# Altium footprint library Crabit.PcbLib: 17 footprints (part 1 of 2)
Each footprint in its own frame and in the unit in brackets; x right, y up, seen from the top. Pads: shape width x height; smd on the part's side, far side on the other; paste and mask are expansions set on the pad; w line width, h text height; cw(c..) or ccw(c..) is an arc to the next point about the centre after c.
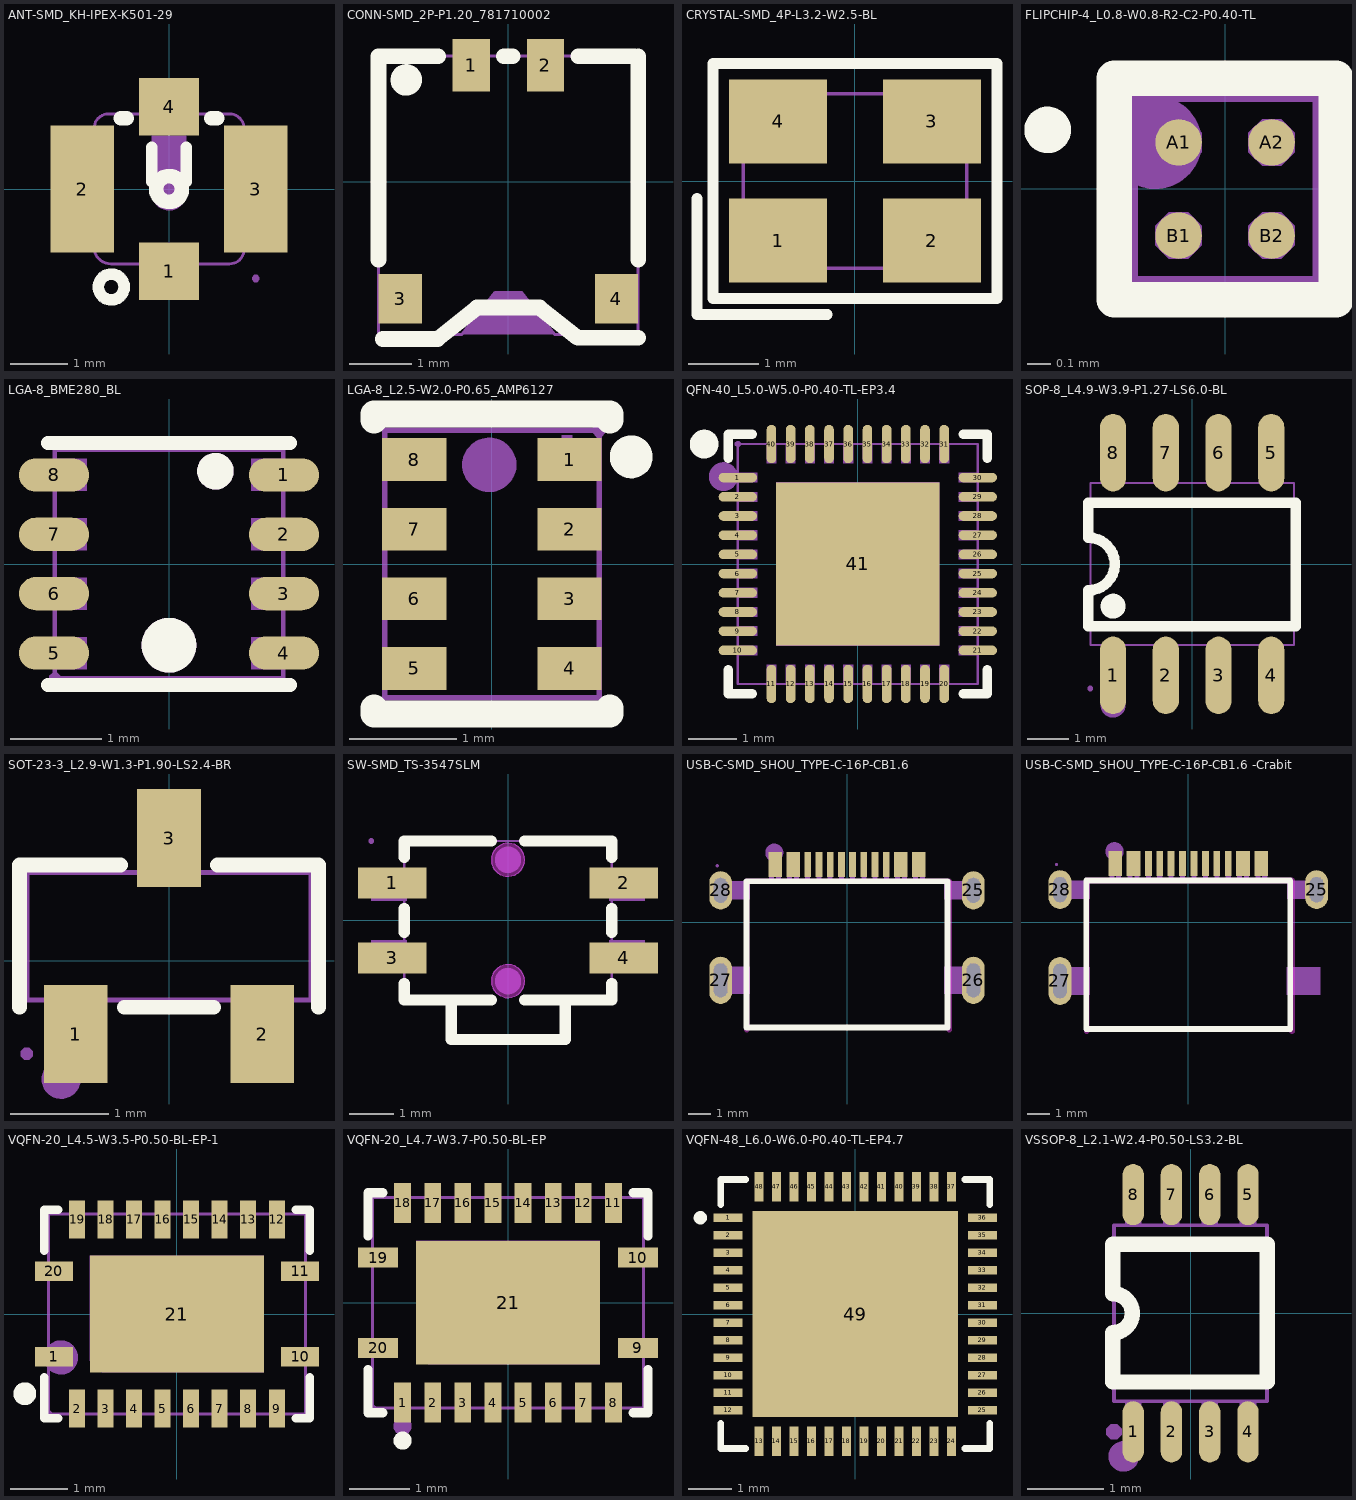
[diagram p0: the footprints below, top view; thin cyan lines are the x and y axes]

## ANT-SMD_KH-IPEX-K501-29 [mm]
pads (4):
  rect 1.049x1.001 smd: 1(0,-1.425) 4(0,1.425)
  rect 1.1x2.2 smd: 2(-1.501,0) 3(1.501,0)
Top Overlay:
  circle w0.201: c-1.001,-1.699 r0.224
  circle w0.254: c0,0 r0.224
  lines w0.201: -0.3,0.124 -0.3,0.724 ; 0.3,0.124 0.3,0.724
  lines w0.254: -0.836,1.224 -0.732,1.224 ; 0.732,1.224 0.836,1.224
Mechanical 16:
  circle w0.3: c0,-0.074 r0.15
  circle w0.201: c-0.3,-1.626 r0.099
  region: 0.3,1.201 -0.3,1.201 -0.3,1.651 0.3,1.651
  region: -0.3,-1.001 0.3,-1.001 0.3,-1.552 -0.3,-1.552
  region: 1.049,-0.899 1.049,0.899 1.501,0.899 1.501,-0.899
  region: -1.049,0.899 -1.049,-0.899 -1.501,-0.899 -1.501,0.899
  region: -0.3,0.925 -0.3,-0.074 0.3,-0.074 0.3,0.925
  region: 1.501,-1.613 1.476,-1.613 1.44,-1.577 1.44,-1.527 1.476,-1.491 1.501,-1.491 1.526,-1.491 1.562,-1.527 1.562,-1.577 1.526,-1.613 1.501,-1.613 1.501,-1.61
  lines w0.051: -1.3,1.054 -1.3,-0.925 -1.3,-1.006 ccw(c-1.008,-1.006) -1.008,-1.298 1.052,-1.298 ccw(c1.052,-1.049) 1.3,-1.049 1.3,-1.044 1.3,1.052 ccw(c1.049,1.052) 1.049,1.303 ; -1.298,1.054 cw(c-1.052,1.054) -1.052,1.3 -1.049,1.3 0.97,1.3 1.049,1.3
3D body "U1~IPEX-SMD_HC-RF-IPEX0303-01~IPEX-SMD_HC-RF-IPEX0303-01~Gh9N.STEP": height 1.27, standoff 0, extent -1.5,-1.55 1.5,1.55

## CONN-SMD_2P-P1.20_781710002 [mm]
pads (4):
  rect 0.6x0.85 smd paste+0 mask+0.05: 1(-0.6,1.887) 2(0.6,1.887)
  rect 0.7x0.8 smd paste+0 mask+0.05: 3(-1.75,-1.887) 4(1.75,-1.887)
Top Overlay:
  circle w0.254: c-1.651,1.651 r0.127
  lines w0.254: -2.1,-1.256 -2.1,-0.513 -2.1,2.032 -1.131,2.032 ; -2.032,-2.54 -1.143,-2.54 -0.508,-2.032 -0.381,-2.032 0.508,-2.032 1.122,-2.519 1.143,-2.519 2.1,-2.519 ; -0.069,2.032 0.069,2.032 ; 1.131,2.032 2.032,2.032 ; 2.1,-1.256 2.1,-0.513 2.1,2.032
Mechanical 6:
  region: -0.75,-2.47 -0.205,-1.785 0.215,-1.785 0.75,-2.465
Mechanical 15:
  region: -0.7,2.065 -0.7,1.69 -0.5,1.69 -0.5,2.065
  region: 0.5,2.065 0.5,1.69 0.7,1.69 0.7,2.065
  region: 1.6,-1.637 1.9,-1.637 1.9,-2.137 1.6,-2.137
  region: -1.9,-1.637 -1.6,-1.637 -1.6,-2.137 -1.9,-2.137
  region: -2.04,2.065 -2.04,2.04 -2.075,2.005 -2.125,2.005 -2.16,2.04 -2.16,2.065 -2.16,2.09 -2.125,2.125 -2.075,2.125 -2.04,2.09 -2.04,2.065
  lines w0.051: -2.1,-2.465 -0.75,-2.465 -0.21,-1.785 0.21,-1.785 0.75,-2.465 2.1,-2.465 2.1,2.035 -2.1,2.035 -2.1,-2.465
3D body "CN1~CONN-SMD_2P-P1.20_781710002~CONN-SMD_2P-P1.20_781710002~pmLh.STEP": height 1.45, standoff 0, extent -2.1,-2.339 2.101,2.191

## CRYSTAL-SMD_4P-L3.2-W2.5-BL [mil]
pads (4):
  rect 55.1x47.2 smd: 1(-43.3,-33.5) 2(43.3,-33.5) 3(43.3,33.5) 4(-43.3,33.5)
Top Overlay:
  lines w6: -88.9,-9.8 -88.9,-75.1 -15.7,-75.1 ; -79.9,-66.1 79.9,-66.1 79.9,66.1 -79.9,66.1 -79.9,-66.1
Mechanical 16:
  circle w10: c-50,-35 r5
  region: -59.1,-13.8 -23.6,-13.8 -23.6,-45.3 -59.1,-45.3
  region: 23.6,-13.8 59.1,-13.8 59.1,-45.3 23.6,-45.3
  region: 23.6,45.3 59.1,45.3 59.1,13.8 23.6,13.8
  region: -59.1,45.3 -23.6,45.3 -23.6,13.8 -59.1,13.8
  region: -63,-51.6 -63.99,-51.6 -65.4,-50.19 -65.4,-48.21 -63.99,-46.8 -63,-46.8 -62.01,-46.8 -60.6,-48.21 -60.6,-50.19 -62.01,-51.6 -63,-51.6
  lines w2: -63,-49.2 63,-49.2 63,49.2 -63,49.2 -63,-49.2

## FLIPCHIP-4_L0.8-W0.8-R2-C2-P0.40-TL [mm]
pads (4):
  round 0.2 smd paste-100 mask+0.051: A1(-0.2,0.2) A2(0.2,0.2) B1(-0.2,-0.2) B2(0.2,-0.2)
Top Overlay:
  circle w0.1: c-0.762,0.254 r0.05
  lines w0.152: -0.476,-0.476 0.476,-0.476 0.476,0.476 -0.476,0.476 -0.476,-0.476
Top Paste:
  region: -0.1,0.28 -0.1,0.12 -0.12,0.1 -0.28,0.1 -0.3,0.12 -0.3,0.28 -0.28,0.3 -0.12,0.3
  region: 0.3,0.28 0.3,0.12 0.28,0.1 0.12,0.1 0.1,0.12 0.1,0.28 0.12,0.3 0.28,0.3
  region: -0.1,-0.12 -0.1,-0.28 -0.12,-0.3 -0.28,-0.3 -0.3,-0.28 -0.3,-0.12 -0.28,-0.1 -0.12,-0.1
  region: 0.3,-0.12 0.3,-0.28 0.28,-0.3 0.12,-0.3 0.1,-0.28 0.1,-0.12 0.12,-0.1 0.28,-0.1
Mechanical 6:
  circle w0.2: c-0.3,0.2 r0.1
Mechanical 15:
  region: -0.34,0.4 -0.34,0.375 -0.375,0.34 -0.425,0.34 -0.46,0.375 -0.46,0.4 -0.46,0.425 -0.425,0.46 -0.375,0.46 -0.34,0.425 -0.34,0.4
  region: -0.1,0.2 -0.1,0.158 -0.158,0.1 -0.241,0.1 -0.3,0.158 -0.3,0.2 -0.3,0.241 -0.241,0.3 -0.158,0.3 -0.1,0.241 -0.1,0.2
  region: 0.3,0.2 0.3,0.158 0.241,0.1 0.158,0.1 0.1,0.158 0.1,0.2 0.1,0.241 0.158,0.3 0.241,0.3 0.3,0.241 0.3,0.2
  region: 0.3,-0.2 0.3,-0.241 0.241,-0.3 0.158,-0.3 0.1,-0.241 0.1,-0.2 0.1,-0.158 0.158,-0.1 0.241,-0.1 0.3,-0.158 0.3,-0.2
  region: -0.1,-0.2 -0.1,-0.241 -0.158,-0.3 -0.241,-0.3 -0.3,-0.241 -0.3,-0.2 -0.3,-0.158 -0.241,-0.1 -0.158,-0.1 -0.1,-0.158 -0.1,-0.2
  lines w0.051: -0.4,-0.4 -0.4,0.4 0.4,0.4 0.4,-0.4 -0.4,-0.4
3D body "U2~FLIPCHIP-4_L0.8-W0.8-R2-C2-P0.40-TL~FLIPCHIP-4_L0.8-W0.8-R2-C2-P0.40-TL~ZRPX.STEP": height 0.61, standoff 0, extent -0.385,-0.385 0.385,0.385

## LGA-8_BME280_BL [mm]
pads (8):
  oval 0.767x0.364 smd: 1(1.259,0.975) 2(1.259,0.325) 3(1.259,-0.325) 4(1.259,-0.975) 5(-1.259,-0.975) 6(-1.259,-0.325) 7(-1.259,0.325) 8(-1.259,0.975)
Top Overlay:
  circle w0.3: c0,-0.889 r0.15
  circle w0.2: c0.508,1.016 r0.1
  lines w0.152: -1.326,-1.326 1.326,-1.326 ; -1.326,1.326 1.326,1.326
Mechanical 6:
  drawing of 34 lines, arcs and shapes, not listed
Mechanical 15:
  region: -1.25,-1.15 -0.9,-1.15 -0.9,-0.8 -1.25,-0.8
  region: -1.25,-0.5 -0.9,-0.5 -0.9,-0.15 -1.25,-0.15
  region: -1.25,0.15 -0.9,0.15 -0.9,0.5 -1.25,0.5
  region: -1.25,0.8 -0.9,0.8 -0.9,1.15 -1.25,1.15
  region: 1.25,0.8 0.9,0.8 0.9,1.15 1.25,1.15
  region: 1.25,0.15 0.9,0.15 0.9,0.5 1.25,0.5
  region: 1.25,-0.5 0.9,-0.5 0.9,-0.15 1.25,-0.15
  region: 1.25,-1.15 0.9,-1.15 0.9,-0.8 1.25,-0.8
  region: -1.19,-1.25 -1.19,-1.275 -1.225,-1.31 -1.275,-1.31 -1.31,-1.275 -1.31,-1.25 -1.31,-1.225 -1.275,-1.19 -1.225,-1.19 -1.19,-1.225 -1.19,-1.25
  lines w0.051: -1.25,-1.25 -1.25,1.25 1.25,1.25 1.25,-1.25 -1.25,-1.25
3D body "U1~LGA-8_BME280_BL~LGA-8_L2.5-W2.5-H0.9-P0.65~ZRPX.STEP": height 0.94, standoff 0, extent -1.25,-1.25 1.25,1.25

## LGA-8_L2.5-W2.0-P0.65_AMP6127 [mm]
pads (8):
  rect 0.6x0.4 smd: 1(0.725,0.975) 2(0.725,0.325) 3(0.725,-0.325) 4(0.725,-0.975) 5(-0.725,-0.975) 6(-0.725,-0.325) 7(-0.725,0.325) 8(-0.725,0.975)
Top Overlay:
  circle w0.2: c1.3,1 r0.1
  lines w0.254: -1.1,-1.344 -1.1,-1.4 1.1,-1.4 1.1,-1.344 ; -1.1,1.344 -1.1,1.4 1.1,1.4 1.1,1.344
Mechanical 6:
  circle w0.254: c-0.025,0.925 r0.127
  region: 0.65,1.2 0.65,0.8 0.75,0.8 0.75,1.2
Mechanical 15:
  region: 1.06,1.25 1.06,1.225 1.025,1.19 0.975,1.19 0.94,1.225 0.94,1.25 0.94,1.275 0.975,1.31 1.025,1.31 1.06,1.275 1.06,1.25
  region: 0.55,1.125 0.9,1.125 0.9,0.825 0.55,0.825
  region: 0.55,0.475 0.9,0.475 0.9,0.175 0.55,0.175
  region: 0.55,-0.175 0.9,-0.175 0.9,-0.475 0.55,-0.475
  region: 0.55,-0.825 0.9,-0.825 0.9,-1.125 0.55,-1.125
  region: -0.9,1.125 -0.55,1.125 -0.55,0.825 -0.9,0.825
  region: -0.9,0.475 -0.55,0.475 -0.55,0.175 -0.9,0.175
  region: -0.9,-0.175 -0.55,-0.175 -0.55,-0.475 -0.9,-0.475
  region: -0.9,-0.825 -0.55,-0.825 -0.55,-1.125 -0.9,-1.125
  lines w0.051: -1,-1.25 1,-1.25 1,1.25 -1,1.25 -1,-1.25
3D body "U1~LGA-8_L2.5-W2.0-P0.65_AMP6127~LGA-8_L2.5-W2.0-P0.65_AMP6127~tHiy.STEP": height 0.96, standoff 0, extent -1,-1.25 1,1.25

## QFN-40_L5.0-W5.0-P0.40-TL-EP3.4 [mm]
pads (41):
  oval 0.8x0.2 smd paste-100 mask+0.05: 1(-2.5,1.8) 2(-2.5,1.4) 3(-2.5,1) 4(-2.5,0.6) 5(-2.5,0.2) 6(-2.5,-0.2) 7(-2.5,-0.6) 8(-2.5,-1) 9(-2.5,-1.4) 10(-2.5,-1.8) 21(2.5,-1.8) 22(2.5,-1.4) 23(2.5,-1) 24(2.5,-0.6) 25(2.5,-0.2) 26(2.5,0.2) 27(2.5,0.6) 28(2.5,1) 29(2.5,1.4) 30(2.5,1.8)
  oval 0.2x0.8 smd paste-100 mask+0.05: 11(-1.8,-2.5) 12(-1.4,-2.5) 13(-1,-2.5) 14(-0.6,-2.5) 15(-0.2,-2.5) 16(0.2,-2.5) 17(0.6,-2.5) 18(1,-2.5) 19(1.4,-2.5) 20(1.8,-2.5) 31(1.8,2.5) 32(1.4,2.5) 33(1,2.5) 34(0.6,2.5) 35(0.2,2.5) 36(-0.2,2.5) 37(-0.6,2.5) 38(-1,2.5) 39(-1.4,2.5) 40(-1.8,2.5)
  rect 3.4x3.4 smd paste-100 mask+0.05: 41(0,0)
Top Overlay:
  lines w0.2: -2.7,-2.2 -2.7,-2.7 -2.2,-2.7 ; -2.7,2.2 -2.7,2.7 -2.2,2.7 ; 2.2,-2.7 2.7,-2.7 2.7,-2.2 ; 2.2,2.7 2.7,2.7 2.7,2.2
  lines w0.3: -3.051,2.497 cw(c-3.201,2.498) -3.051,2.499
Top Paste:
  drawing of 41 lines, arcs and shapes, not listed
Mechanical 6:
  circle w0.3: c-2.802,1.82 r0.15
Mechanical 15:
  drawing of 46 lines, arcs and shapes, not listed
3D body "QFN-40_L5.0-W5.0-P0.40-TL-EP3.4~QFN-40_L5.0-W5.0-H0.9-P0.4-TL-EP~GaEe.STEP": height 0.85, standoff 0, extent -2.5,-2.5 2.5,2.5

## SOP-8_L4.9-W3.9-P1.27-LS6.0-BL [mm]
pads (8):
  oval 0.63x1.864 smd: 1(-1.905,-2.682) 2(-0.635,-2.682) 3(0.635,-2.682) 4(1.905,-2.682) 5(1.905,2.682) 6(0.635,2.682) 7(-0.635,2.682) 8(-1.905,2.682)
Top Overlay:
  circle w0.3: c-1.905,-1.016 r0.15
  lines w0.254: -2.499,-1.499 -2.499,-0.635 ccw(c-2.499,0) -2.499,0.635 -2.499,1.481 2.499,1.481 2.499,-1.499 -2.499,-1.499
Mechanical 16:
  circle w0.3: c-1.905,-3.401 r0.15
  region: -2.451,-2.939 -2.426,-2.939 -2.39,-2.974 -2.39,-3.025 -2.426,-3.061 -2.451,-3.061 -2.476,-3.061 -2.512,-3.025 -2.512,-2.974 -2.476,-2.939 -2.451,-2.939
  region: 1.694,2.164 1.694,3 2.116,3 2.116,2.164
  region: 0.424,2.164 0.424,3 0.846,3 0.846,2.164
  region: -0.846,2.164 -0.846,3 -0.424,3 -0.424,2.164
  region: -2.116,2.164 -2.116,3 -1.694,3 -1.694,2.164
  region: 1.694,-3 1.694,-2.164 2.116,-2.164 2.116,-3
  region: 0.424,-3 0.424,-2.164 0.846,-2.164 0.846,-3
  region: -0.846,-3 -0.846,-2.164 -0.424,-2.164 -0.424,-3
  region: -2.116,-3 -2.116,-2.164 -1.694,-2.164 -1.694,-3
  region: 1.694,2.233 2.116,2.233 2.116,1.943 1.694,1.943
  region: 0.424,2.233 0.846,2.233 0.846,1.943 0.424,1.943
  region: -0.846,2.233 -0.424,2.233 -0.424,1.943 -0.846,1.943
  region: -2.116,2.233 -1.694,2.233 -1.694,1.943 -2.116,1.943
  region: -1.694,-2.233 -2.116,-2.233 -2.116,-1.943 -1.694,-1.943
  region: -0.424,-2.233 -0.846,-2.233 -0.846,-1.943 -0.424,-1.943
  region: 0.846,-2.233 0.424,-2.233 0.424,-1.943 0.846,-1.943
  region: 2.116,-2.233 1.694,-2.233 1.694,-1.943 2.116,-1.943
  lines w0.051: -2.451,-1.951 -2.451,1.951 2.451,1.951 2.451,-1.951 -2.451,-1.951
3D body "SOP8.STEP": height 1.6, standoff 0, extent -2.51,-3.021 2.51,3.021

## SOT-23-3_L2.9-W1.3-P1.90-LS2.4-BR [mm]
pads (3):
  rect 0.65x1 smd: 1(-0.95,-0.746) 2(0.95,-0.746) 3(0,1.254)
Top Overlay:
  lines w0.152: -1.526,-0.472 -1.526,0.98 -0.495,0.98 ; -0.455,-0.472 0.455,-0.472 ; 0.495,0.98 1.526,0.98 1.526,-0.472
Mechanical 6:
  circle w0.2: c-1.1,-1.206 r0.1
Mechanical 15:
  region: -0.215,1.454 0.215,1.454 0.215,1.154 -0.215,1.154
  region: -0.215,1.164 0.215,1.164 0.215,0.894 -0.215,0.894
  region: -1.165,-0.646 -0.735,-0.646 -0.735,-0.946 -1.165,-0.946
  region: -1.165,-0.386 -0.735,-0.386 -0.735,-0.656 -1.165,-0.656
  region: 0.735,-0.646 1.165,-0.646 1.165,-0.946 0.735,-0.946
  region: 0.735,-0.386 1.165,-0.386 1.165,-0.656 0.735,-0.656
  region: -1.45,-1.006 -1.475,-1.006 -1.51,-0.971 -1.51,-0.921 -1.475,-0.886 -1.45,-0.886 -1.425,-0.886 -1.39,-0.921 -1.39,-0.971 -1.425,-1.006 -1.45,-1.006
  lines w0.051: -1.45,-0.396 -1.45,0.904 1.45,0.904 1.45,-0.396 -1.45,-0.396
3D body "SOT-23-3.STEP": height 1.2, standoff 0, extent -1.45,-1.146 1.45,1.654

## SW-SMD_TS-3547SLM [mm]
pads (4):
  rect 1.55x0.7 smd: 1(-2.625,0.85) 2(2.625,0.85) 3(-2.625,-0.85) 4(2.625,-0.85)
Top Overlay:
  lines w0.254: -2.35,-1.431 -2.35,-1.8 -0.376,-1.8 ; -2.35,-0.269 -2.35,0.269 ; -2.35,1.431 -2.35,1.8 -0.376,1.8 ; -1.285,-1.8 ccw(c-1.284,-1.801) -1.285,-1.801 -1.285,-2.7 0.015,-2.7 ; 0,-2.7 1.3,-2.7 1.3,-1.8 ; 0.376,-1.8 2.35,-1.8 2.35,-1.431 ; 0.376,1.8 2.35,1.8 2.35,1.431 ; 2.35,-0.269 2.35,0.269
Keep-Out Layer:
  board cut-out: 0.375,1.375 0.375,1.3 0.318,1.162 0.212,1.057 0.075,1 -0.075,1 -0.212,1.057 -0.318,1.162 -0.375,1.3 -0.375,1.375 -0.375,1.449 -0.318,1.587 -0.212,1.693 -0.075,1.75 0.075,1.75 0.212,1.693 0.318,1.587 0.375,1.449 0.375,1.375
  board cut-out: 0.375,-1.375 0.375,-1.449 0.318,-1.587 0.212,-1.693 0.075,-1.75 -0.075,-1.75 -0.212,-1.693 -0.318,-1.587 -0.375,-1.449 -0.375,-1.375 -0.375,-1.3 -0.318,-1.162 -0.212,-1.057 -0.075,-1 0.075,-1 0.212,-1.057 0.318,-1.162 0.375,-1.3 0.375,-1.375
Keep-Out Layer:
  circle w0.005: c0,1.375 r0.375
  circle w0.005: c0,-1.375 r0.375
  region: 0.375,1.375 0.375,1.3 0.318,1.162 0.212,1.057 0.075,1 -0.075,1 -0.212,1.057 -0.318,1.162 -0.375,1.3 -0.375,1.375 -0.375,1.449 -0.318,1.587 -0.212,1.693 -0.075,1.75 0.075,1.75 0.212,1.693 0.318,1.587 0.375,1.449 0.375,1.375
  region: 0.375,-1.375 0.375,-1.449 0.318,-1.587 0.212,-1.693 0.075,-1.75 -0.075,-1.75 -0.212,-1.693 -0.318,-1.587 -0.375,-1.449 -0.375,-1.375 -0.375,-1.3 -0.318,-1.162 -0.212,-1.057 -0.075,-1 0.075,-1 0.212,-1.057 0.318,-1.162 0.375,-1.3 0.375,-1.375
Mechanical 1:
  circle w0.005: c0,1.375 r0.375
  circle w0.005: c0,-1.375 r0.375
Mechanical 6:
  circle w0.3: c0,-1.375 r0.15
  circle w0.3: c0,1.375 r0.15
Mechanical 15:
  region: -3.04,1.8 -3.04,1.775 -3.075,1.74 -3.125,1.74 -3.16,1.775 -3.16,1.8 -3.16,1.825 -3.125,1.86 -3.075,1.86 -3.04,1.825 -3.04,1.8
  region: 2.3,1.05 3.1,1.05 3.1,0.45 2.3,0.45
  region: 2.3,-0.45 3.1,-0.45 3.1,-1.05 2.3,-1.05
  region: -3.1,-0.45 -2.3,-0.45 -2.3,-1.05 -3.1,-1.05
  region: -3.1,1.05 -2.3,1.05 -2.3,0.45 -3.1,0.45
  lines w0.051: -2.35,-1.8 -1.3,-1.8 -1.3,-2.7 1.3,-2.7 1.3,-1.8 2.35,-1.8 2.35,1.8 -2.35,1.8 -2.35,-1.8
3D body "SW1~SW-SMD_TS-3547SLM~SW-SMD_TS-3547SLM~YKUx.STEP": height 1.65, standoff -0.65, extent -3.1,-2.752 3.1,1.799

## USB-C-SMD_SHOU_TYPE-C-16P-CB1.6 [mm]
pads (20):
  oval 1x1.7 hole 0.6 slot 1.1 at 90 deg paste+0 mask+0.05: 25(5.62,1.425) 28(-5.62,1.425)
  oval 1x2.1 hole 0.6 slot 1.5 at 90 deg copper offset 0,0 paste+0 mask+0.05: 26(5.62,-2.575) 27(-5.62,-2.575)
  rect 0.3x1.1 smd paste-100 mask+0.05: A1(-3.35,2.575) A4(-2.55,2.575) A5(-1.25,2.575) A6(-0.25,2.575) A7(0.25,2.575) A8(1.25,2.575) A9(2.55,2.575) A12(3.35,2.575) B1(3.05,2.575) B4(2.25,2.575) B5(1.75,2.575) B6(0.75,2.575) B7(-0.75,2.575) B8(-1.75,2.575) B9(-2.25,2.575) B12(-3.05,2.575)
Top Overlay:
  lines w0.254: -4.47,-4.675 -4.47,1.825 4.47,1.825 4.47,-4.675 -4.47,-4.675
Top Paste:
  drawing of 16 lines, arcs and shapes, not listed
Keep-Out Layer:
  lines w0.254: -4.451,1.824 4.549,1.824 ; -4.451,1.824 -4.451,-4.776 -4.451,1.824 ; -4.451,1.824 4.549,1.824 ; 4.549,1.824 4.549,-4.776 4.549,1.824
Mechanical 6:
  circle w0.4: c-3.232,3.101 r0.2
Mechanical 15:
  region: -5.71,2.524 -5.71,2.499 -5.745,2.464 -5.795,2.464 -5.83,2.499 -5.83,2.524 -5.83,2.549 -5.795,2.584 -5.745,2.584 -5.71,2.549 -5.71,2.524
  region: -3.45,2.524 -3.25,2.524 -3.25,1.724 -3.45,1.724
  region: -3.15,2.524 -2.95,2.524 -2.95,1.724 -3.15,1.724
  region: -2.65,2.524 -2.45,2.524 -2.45,1.724 -2.65,1.724
  region: -2.35,2.524 -2.15,2.524 -2.15,1.724 -2.35,1.724
  region: -1.85,2.524 -1.65,2.524 -1.65,1.724 -1.85,1.724
  region: -1.35,2.524 -1.15,2.524 -1.15,1.724 -1.35,1.724
  region: -0.85,2.524 -0.65,2.524 -0.65,1.724 -0.85,1.724
  region: -0.35,2.524 -0.15,2.524 -0.15,1.724 -0.35,1.724
  region: 0.15,2.524 0.35,2.524 0.35,1.724 0.15,1.724
  region: 0.65,2.524 0.85,2.524 0.85,1.724 0.65,1.724
  region: 1.15,2.524 1.35,2.524 1.35,1.724 1.15,1.724
  region: 1.65,2.524 1.85,2.524 1.85,1.724 1.65,1.724
  region: 2.15,2.524 2.35,2.524 2.35,1.724 2.15,1.724
  region: 2.45,2.524 2.65,2.524 2.65,1.724 2.45,1.724
  region: 2.95,2.524 3.15,2.524 3.15,1.724 2.95,1.724
  region: 3.25,2.524 3.45,2.524 3.45,1.724 3.25,1.724
  region: -5.77,1.825 -5.47,1.825 -5.47,1.025 -5.77,1.025
  region: 5.47,1.825 5.77,1.825 5.77,1.025 5.47,1.025
  region: -5.77,-1.975 -5.47,-1.975 -5.47,-3.175 -5.77,-3.175
  region: 5.47,-1.975 5.77,-1.975 5.77,-3.175 5.47,-3.175
  region: -4.315,1.02 -5.765,1.02 -5.765,1.82 -4.315,1.82
  region: -4.315,-3.17 -5.765,-3.17 -5.765,-1.97 -4.315,-1.97
  region: 5.775,1.02 4.325,1.02 4.325,1.82 5.775,1.82
  region: 5.77,-3.18 4.32,-3.18 4.32,-1.98 5.77,-1.98
  lines w0.051: -4.47,-4.676 -4.47,1.824 4.47,1.824 4.47,-4.676 -4.47,-4.676
3D body "USB1~USB-C-SMD_SHOU_TYPE-C-16P-CB1.6~USB-C-SMD_SHOU_TYPE-C-16P-CB1.6~pmLh.STEP": height 1.56, standoff -1.6, extent -5.77,-4.548 5.77,2.652

## USB-C-SMD_SHOU_TYPE-C-16P-CB1.6 -Crabit [mm]
pads (19):
  oval 1x1.7 hole 0.6 slot 1.1 at 90 deg paste+0 mask+0.05: 25(5.62,1.425) 28(-5.62,1.425)
  oval 1x2.1 hole 0.6 slot 1.5 at 90 deg copper offset 0,0 paste+0 mask+0.05: 27(-5.62,-2.575)
  rect 0.3x1.1 smd paste-100 mask+0.05: A1(-3.35,2.575) A4(-2.55,2.575) A5(-1.25,2.575) A6(-0.25,2.575) A7(0.25,2.575) A8(1.25,2.575) A9(2.55,2.575) A12(3.35,2.575) B1(3.05,2.575) B4(2.25,2.575) B5(1.75,2.575) B6(0.75,2.575) B7(-0.75,2.575) B8(-1.75,2.575) B9(-2.25,2.575) B12(-3.05,2.575)
Top Overlay:
  lines w0.254: -4.47,-4.675 -4.47,1.825 4.47,1.825 4.47,-4.675 -4.47,-4.675
Top Paste:
  drawing of 15 lines, arcs and shapes, not listed
Keep-Out Layer:
  lines w0.254: -4.451,1.824 4.549,1.824 ; -4.451,1.824 -4.451,-4.776 -4.451,1.824 ; -4.451,1.824 4.549,1.824 ; 4.549,1.824 4.549,-4.776 4.549,1.824
Mechanical 6:
  circle w0.4: c-3.232,3.101 r0.2
Mechanical 15:
  region: -5.71,2.524 -5.71,2.499 -5.745,2.464 -5.795,2.464 -5.83,2.499 -5.83,2.524 -5.83,2.549 -5.795,2.584 -5.745,2.584 -5.71,2.549 -5.71,2.524
  region: -3.45,2.524 -3.25,2.524 -3.25,1.724 -3.45,1.724
  region: -3.15,2.524 -2.95,2.524 -2.95,1.724 -3.15,1.724
  region: -2.65,2.524 -2.45,2.524 -2.45,1.724 -2.65,1.724
  region: -2.35,2.524 -2.15,2.524 -2.15,1.724 -2.35,1.724
  region: -1.85,2.524 -1.65,2.524 -1.65,1.724 -1.85,1.724
  region: -1.35,2.524 -1.15,2.524 -1.15,1.724 -1.35,1.724
  region: -0.85,2.524 -0.65,2.524 -0.65,1.724 -0.85,1.724
  region: -0.35,2.524 -0.15,2.524 -0.15,1.724 -0.35,1.724
  region: 0.15,2.524 0.35,2.524 0.35,1.724 0.15,1.724
  region: 0.65,2.524 0.85,2.524 0.85,1.724 0.65,1.724
  region: 1.15,2.524 1.35,2.524 1.35,1.724 1.15,1.724
  region: 1.65,2.524 1.85,2.524 1.85,1.724 1.65,1.724
  region: 2.15,2.524 2.35,2.524 2.35,1.724 2.15,1.724
  region: 2.45,2.524 2.65,2.524 2.65,1.724 2.45,1.724
  region: 2.95,2.524 3.15,2.524 3.15,1.724 2.95,1.724
  region: 3.25,2.524 3.45,2.524 3.45,1.724 3.25,1.724
  region: -5.77,1.825 -5.47,1.825 -5.47,1.025 -5.77,1.025
  region: 5.47,1.825 5.77,1.825 5.77,1.025 5.47,1.025
  region: -5.77,-1.975 -5.47,-1.975 -5.47,-3.175 -5.77,-3.175
  region: 5.47,-1.975 5.77,-1.975 5.77,-3.175 5.47,-3.175
  region: -4.315,1.02 -5.765,1.02 -5.765,1.82 -4.315,1.82
  region: -4.315,-3.17 -5.765,-3.17 -5.765,-1.97 -4.315,-1.97
  region: 5.775,1.02 4.325,1.02 4.325,1.82 5.775,1.82
  region: 5.77,-3.18 4.32,-3.18 4.32,-1.98 5.77,-1.98
  lines w0.051: -4.47,-4.676 -4.47,1.824 4.47,1.824 4.47,-4.676 -4.47,-4.676
3D body "USB1~USB-C-SMD_SHOU_TYPE-C-16P-CB1.6~USB-C-SMD_SHOU_TYPE-C-16P-CB1.6~pmLh.STEP": height 1.56, standoff -1.6, extent -5.77,-4.548 5.77,2.652

## VQFN-20_L4.5-W3.5-P0.50-BL-EP-1 [mm]
pads (21):
  rect 0.665x0.336 smd: 1(-2.157,-0.75) 10(2.157,-0.75) 11(2.157,0.75) 20(-2.157,0.75)
  rect 0.28x0.665 smd: 2(-1.75,-1.658) 3(-1.25,-1.658) 4(-0.75,-1.658) 5(-0.25,-1.658) 6(0.25,-1.658) 7(0.75,-1.658) 8(1.25,-1.658) 9(1.75,-1.658) 12(1.75,1.658) 13(1.25,1.658) 14(0.75,1.658) 15(0.25,1.658) 16(-0.25,1.658) 17(-0.75,1.658) 18(-1.25,1.658) 19(-1.75,1.658)
  rect 3.05x2.05 smd: 21(0,0)
Top Overlay:
  circle w0.2: c-2.667,-1.397 r0.1
  lines w0.152: -2.326,-1.109 -2.326,-1.826 -2.08,-1.826 ; -2.326,1.109 -2.326,1.826 -2.08,1.826 ; 2.08,-1.826 2.326,-1.826 2.326,-1.109 ; 2.08,1.826 2.326,1.826 2.326,1.109
Mechanical 6:
  circle w0.3: c-2.032,-0.762 r0.15
Mechanical 15:
  region: -2.19,-1.75 -2.19,-1.775 -2.225,-1.81 -2.275,-1.81 -2.31,-1.775 -2.31,-1.75 -2.31,-1.725 -2.275,-1.69 -2.225,-1.69 -2.19,-1.725 -2.19,-1.75
  region: -1.87,-1.75 -1.87,-1.35 -1.63,-1.35 -1.63,-1.75
  region: -1.37,-1.75 -1.37,-1.35 -1.13,-1.35 -1.13,-1.75
  region: -0.87,-1.75 -0.87,-1.35 -0.63,-1.35 -0.63,-1.75
  region: -0.37,-1.75 -0.37,-1.35 -0.13,-1.35 -0.13,-1.75
  region: 0.13,-1.75 0.13,-1.35 0.37,-1.35 0.37,-1.75
  region: 0.63,-1.75 0.63,-1.35 0.87,-1.35 0.87,-1.75
  region: 1.13,-1.75 1.13,-1.35 1.37,-1.35 1.37,-1.75
  region: 1.63,-1.75 1.63,-1.35 1.87,-1.35 1.87,-1.75
  region: 1.85,-0.87 1.85,-0.63 2.25,-0.63 2.25,-0.87
  region: 1.85,0.63 1.85,0.87 2.25,0.87 2.25,0.63
  region: 1.63,1.75 1.63,1.35 1.87,1.35 1.87,1.75
  region: 1.13,1.75 1.13,1.35 1.37,1.35 1.37,1.75
  region: 0.63,1.75 0.63,1.35 0.87,1.35 0.87,1.75
  region: 0.13,1.75 0.13,1.35 0.37,1.35 0.37,1.75
  region: -0.37,1.75 -0.37,1.35 -0.13,1.35 -0.13,1.75
  region: -0.87,1.75 -0.87,1.35 -0.63,1.35 -0.63,1.75
  region: -1.37,1.75 -1.37,1.35 -1.13,1.35 -1.13,1.75
  region: -1.87,1.75 -1.87,1.35 -1.63,1.35 -1.63,1.75
  region: -1.85,0.63 -1.85,0.87 -2.25,0.87 -2.25,0.63
  region: -1.85,-0.87 -1.85,-0.63 -2.25,-0.63 -2.25,-0.87
  region: -1.525,-0.82 -1.525,1.025 1.525,1.025 1.525,-1.025 -1.32,-1.025
  lines w0.051: -2.25,-1.75 -2.25,1.75 2.25,1.75 2.25,-1.75 -2.25,-1.75
3D body "U1~VQFN-20_L4.5-W3.5-P0.50-BL-EP-1~VQFN-20_L4.5-W3.5-H1.0-P0.50~Vvab.STEP": height 1.02, standoff 0, extent -2.26,-1.76 2.26,1.76

## VQFN-20_L4.7-W3.7-P0.50-BL-EP [mm]
pads (21):
  rect 0.28x0.665 smd: 1(-1.75,-1.658) 2(-1.25,-1.658) 3(-0.75,-1.658) 4(-0.25,-1.658) 5(0.25,-1.658) 6(0.75,-1.658) 7(1.25,-1.658) 8(1.75,-1.658) 11(1.75,1.658) 12(1.25,1.658) 13(0.75,1.658) 14(0.25,1.658) 15(-0.25,1.658) 16(-0.75,1.658) 17(-1.25,1.658) 18(-1.75,1.658)
  rect 0.665x0.336 smd: 9(2.157,-0.75) 10(2.157,0.75) 19(-2.157,0.75) 20(-2.157,-0.75)
  rect 3.05x2.05 smd: 21(0,0)
Top Overlay:
  circle w0.15: c-1.75,-2.29 r0.075
  lines w0.152: -2.326,-1.109 -2.326,-1.826 -2.08,-1.826 ; -2.326,1.109 -2.326,1.826 -2.08,1.826 ; 2.08,-1.826 2.326,-1.826 2.326,-1.109 ; 2.08,1.826 2.326,1.826 2.326,1.109
Mechanical 6:
  circle w0.15: c-1.75,-2.05 r0.075
Mechanical 15:
  region: -1.525,-0.82 -1.525,1.025 1.525,1.025 1.525,-1.025 -1.32,-1.025
  region: -1.85,-0.87 -1.85,-0.63 -2.25,-0.63 -2.25,-0.87
  region: -1.85,0.63 -1.85,0.87 -2.25,0.87 -2.25,0.63
  region: -1.87,1.75 -1.87,1.35 -1.63,1.35 -1.63,1.75
  region: -1.37,1.75 -1.37,1.35 -1.13,1.35 -1.13,1.75
  region: -0.87,1.75 -0.87,1.35 -0.63,1.35 -0.63,1.75
  region: -0.37,1.75 -0.37,1.35 -0.13,1.35 -0.13,1.75
  region: 0.13,1.75 0.13,1.35 0.37,1.35 0.37,1.75
  region: 0.63,1.75 0.63,1.35 0.87,1.35 0.87,1.75
  region: 1.13,1.75 1.13,1.35 1.37,1.35 1.37,1.75
  region: 1.63,1.75 1.63,1.35 1.87,1.35 1.87,1.75
  region: 1.85,0.63 1.85,0.87 2.25,0.87 2.25,0.63
  region: 1.85,-0.87 1.85,-0.63 2.25,-0.63 2.25,-0.87
  region: 1.63,-1.75 1.63,-1.35 1.87,-1.35 1.87,-1.75
  region: 1.13,-1.75 1.13,-1.35 1.37,-1.35 1.37,-1.75
  region: 0.63,-1.75 0.63,-1.35 0.87,-1.35 0.87,-1.75
  region: 0.13,-1.75 0.13,-1.35 0.37,-1.35 0.37,-1.75
  region: -0.37,-1.75 -0.37,-1.35 -0.13,-1.35 -0.13,-1.75
  region: -0.87,-1.75 -0.87,-1.35 -0.63,-1.35 -0.63,-1.75
  region: -1.37,-1.75 -1.37,-1.35 -1.13,-1.35 -1.13,-1.75
  region: -1.87,-1.75 -1.87,-1.35 -1.63,-1.35 -1.63,-1.75
  region: -2.19,-1.75 -2.19,-1.775 -2.225,-1.81 -2.275,-1.81 -2.31,-1.775 -2.31,-1.75 -2.31,-1.725 -2.275,-1.69 -2.225,-1.69 -2.19,-1.725 -2.19,-1.75
  lines w0.051: -2.25,-1.75 2.25,-1.75 2.25,1.75 -2.25,1.75 -2.25,-1.75
3D body "U2~VQFN-20_L4.7-W3.7-P0.50-BL-EP~VQFN-20_L4.5-W3.5-H1.0-P0.50~GaEe.STEP": height 1.02, standoff 0, extent -2.26,-1.76 2.26,1.76

## VQFN-48_L6.0-W6.0-P0.40-TL-EP4.7 [mil]
pads (49):
  rect 26.2x7.9 smd: 1(-114.5,86.6) 2(-114.5,70.9) 3(-114.5,55.1) 4(-114.5,39.4) 5(-114.5,23.6) 6(-114.5,7.9) 7(-114.5,-7.9) 8(-114.5,-23.6) 9(-114.5,-39.4) 10(-114.5,-55.1) 11(-114.5,-70.9) 12(-114.5,-86.6) 25(114.5,-86.6) 26(114.5,-70.9) 27(114.5,-55.1) 28(114.5,-39.4) 29(114.5,-23.6) 30(114.5,-7.9) 31(114.5,7.9) 32(114.5,23.6) 33(114.5,39.4) 34(114.5,55.1) 35(114.5,70.9) 36(114.5,86.6)
  rect 7.9x26.2 smd: 13(-86.6,-114.5) 14(-70.9,-114.5) 15(-55.1,-114.5) 16(-39.4,-114.5) 17(-23.6,-114.5) 18(-7.9,-114.5) 19(7.9,-114.5) 20(23.6,-114.5) 21(39.4,-114.5) 22(55.1,-114.5) 23(70.9,-114.5) 24(86.6,-114.5) 37(86.6,114.5) 38(70.9,114.5) 39(55.1,114.5) 40(39.4,114.5) 41(23.6,114.5) 42(7.9,114.5) 43(-7.9,114.5) 44(-23.6,114.5) 45(-39.4,114.5) 46(-55.1,114.5) 47(-70.9,114.5) 48(-86.6,114.5)
  rect 185x185 smd: 49(0,0)
Top Overlay:
  circle w5.9: c-139.4,86.6 r3
  lines w6: -121.1,-98.5 -121.1,-121.1 -98.5,-121.1 ; -121.1,98.5 -121.1,121.1 -98.5,121.1 ; 98.5,-121.1 121.1,-121.1 121.1,-98.5 ; 98.5,121.1 121.1,121.1 121.1,98.5
3D body "VQFN-48_L6.0-W6.0-P0.40-TL-EP4.7~VQFN-48_L6.0-W6.0-P0.40-TL-EP4.7~GdNR.STEP": height 33.86, standoff 0, extent -118.5,-115 118.5,122.01

## VSSOP-8_L2.1-W2.4-P0.50-LS3.2-BL [mm]
pads (8):
  oval 0.28x0.8 smd: 1(-0.75,-1.55) 2(-0.25,-1.55) 3(0.25,-1.55) 4(0.75,-1.55) 5(0.75,1.55) 6(0.25,1.55) 7(-0.25,1.55) 8(-0.75,1.55)
Top Overlay:
  lines w0.2: -1.016,-0.9 -1.016,-0.254 ccw(c-1.016,0) -1.016,0.254 -1.016,0.9 ; -1,-0.9 1,-0.9 1,0.9 -1,0.9
Mechanical 6:
  circle w0.2: c-0.874,-1.87 r0.1
Mechanical 15:
  region: -0.9,-1.55 -0.9,-1.591 -0.959,-1.65 -1.041,-1.65 -1.1,-1.591 -1.1,-1.55 -1.1,-1.509 -1.041,-1.45 -0.959,-1.45 -0.9,-1.509 -0.9,-1.55
  region: -0.855,-1.285 -0.855,-1.14 -0.645,-1.14 -0.645,-1.285
  region: -0.855,-1.55 -0.855,-1.275 -0.645,-1.275 -0.645,-1.55
  region: -0.355,-1.285 -0.355,-1.14 -0.145,-1.14 -0.145,-1.285
  region: -0.355,-1.55 -0.355,-1.275 -0.145,-1.275 -0.145,-1.55
  region: 0.145,-1.285 0.145,-1.14 0.355,-1.14 0.355,-1.285
  region: 0.145,-1.55 0.145,-1.275 0.355,-1.275 0.355,-1.55
  region: 0.645,-1.285 0.645,-1.14 0.855,-1.14 0.855,-1.285
  region: 0.645,-1.55 0.645,-1.275 0.855,-1.275 0.855,-1.55
  region: 0.645,1.14 0.645,1.285 0.855,1.285 0.855,1.14
  region: 0.645,1.275 0.645,1.55 0.855,1.55 0.855,1.275
  region: 0.145,1.14 0.145,1.285 0.355,1.285 0.355,1.14
  region: 0.145,1.275 0.145,1.55 0.355,1.55 0.355,1.275
  region: -0.355,1.14 -0.355,1.285 -0.145,1.285 -0.145,1.14
  region: -0.355,1.275 -0.355,1.55 -0.145,1.55 -0.145,1.275
  region: -0.855,1.14 -0.855,1.285 -0.645,1.285 -0.645,1.14
  region: -0.855,1.275 -0.855,1.55 -0.645,1.55 -0.645,1.275
  lines w0.051: -1,-1.15 1,-1.15 1,1.15 -1,1.15 -1,-1.15
3D body "U1~VSSOP-8_L2.1-W2.4-P0.50-LS3.2-BL~VSSOP-8_L2.0-W2.3-H0.9-LS3.1-P0.50~P1bS.STEP": height 1.05, standoff 0, extent -1,-1.756 1,1.756